# Altium schematic symbol library ESP32_S3_Pico.SchLib: 1 symbol
Pins are listed as number, name and electrical type; pins without a type are passive.

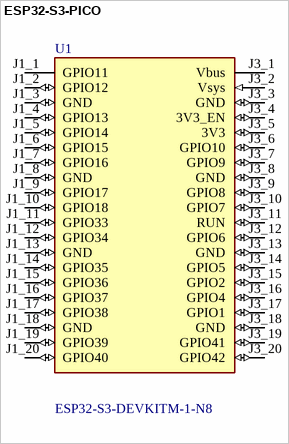
[diagram p0: symbol ESP32-S3-PICO]

## ESP32-S3-PICO
designator U1, comment ESP32-S3-DEVKITM-1-N8
MF: {'manufacturer': u'Espressif Systems'}; Package: None; Price: None; Value: *; MP: ESP32-S3-DEVKITM-1-N8; Availability: Unavailable
footprint MODULE_ESP32-S3-DEVKITM-1-N8
footprint PCBComponent_1
pins: J1_1 GPIO11 (power), J1_2 GPIO12 (io), J1_3 GND (io), J1_4 GPIO13 (io), J1_5 GPIO14 (io), J1_6 GPIO15 (io), J1_7 GPIO16 (io), J1_8 GND (io), J1_9 GPIO17 (io), J1_10 GPIO18 (io), J1_11 GPIO33 (io), J1_12 GPIO34 (io), J1_13 GND (io), J1_14 GPIO35 (io), J1_15 GPIO36 (io), J1_16 GPIO37 (io), J1_17 GPIO38 (io), J1_18 GND (io), J1_19 GPIO39 (io), J1_20 GPIO40 (io), J3_1 Vbus (power), J3_2 Vsys (in), J3_3 GND (io), J3_4 3V3_EN (io), J3_5 3V3 (io), J3_6 GPIO10 (io), J3_7 GPIO9 (io), J3_8 GND (io), J3_9 GPIO8 (io), J3_10 GPIO7 (io), J3_11 RUN (io), J3_12 GPIO6 (io), J3_13 GND (io), J3_14 GPIO5 (io), J3_15 GPIO2 (io), J3_16 GPIO4 (io), J3_17 GPIO1 (io), J3_18 GND (io), J3_19 GPIO41 (io), J3_20 GPIO42 (io)